# Altium schematic symbol library 74HC04D.SchLib: 1 symbol
Pins are listed as number, name and electrical type; pins without a type are passive.

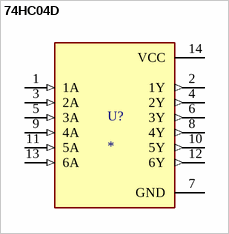
[diagram p0: symbol 74HC04D]

## 74HC04D
designator U?
Hex Inverters; MF: TAEJIN; MP: 74HC04D; SnapEDA_Link: https://www.snapeda.com/parts/74HC04D/TAEJIN/view-part/?ref=snap; Package: SOP-14 TAEJIN; Value: *; Check_prices: https://www.snapeda.com/parts/74HC04D/TAEJIN/view-part/?ref=eda
footprint SOP127P600X170-14N
pins: 1 1A (in), 2 1Y (out), 3 2A (in), 4 2Y (out), 5 3A (in), 6 3Y (out), 7 GND (power), 8 4Y (out), 9 4A (in), 10 5Y (out), 11 5A (in), 12 6Y (out), 13 6A (in), 14 VCC (power)